# Altium schematic symbol library EVQ-P2002M.SchLib: 1 symbol
Pins are listed as number, name and electrical type; pins without a type are passive.

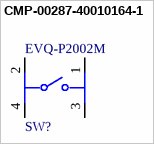
[diagram p0: symbol CMP-00287-40010164-1]

## CMP-00287-40010164-1
designator SW?, comment EVQ-P2002M
EVQ-P2002M Switch Tactile N.O. SPST Button J-Bend 0.02A 15VDC 1N SMD Automotive Embossed T/R; NexarPartId: 40010164; Mechanical Life: 1Mcycles; Voltage Rating (DC): 15V; Contact Resistance: 100mΩ; Illumination Type: Illuminated, Non-Illuminated; Actuator Length: 450µm; Number of Positions: 2; Current Rating: 20mA; Switch Function: Off-Mom; Switch Travel: 250µm; Electrical Life: 1Mcycles; Lead Free: Lead Free; Mount: Surface Mount; Max Voltage Rating (DC): 15V; Termination: J-Bend; Max Operating Temperature: 85°C; Throw Configuration: SPST; Height: 2.3mm; Contact Current Rating: 20mA; Radiation Hardening: No; Min Operating Temperature: -40°C; Orientation: Straight; RoHS: Compliant; Operating Force: 1N; Life (Cycles): 1Mcycles; REACH SVHC: No SVHC
footprint FP-EVQ-P2002M-MFG
pins: 1, 2, 3, 4